# Altium footprint library ESP32_DEV_KIT.PcbLib: 10 footprints
Each footprint in its own frame and in the unit in brackets; x right, y up, seen from the top. Pads: shape width x height; smd on the part's side, far side on the other; paste and mask are expansions set on the pad; w line width, h text height; cw(c..) or ccw(c..) is an arc to the next point about the centre after c.
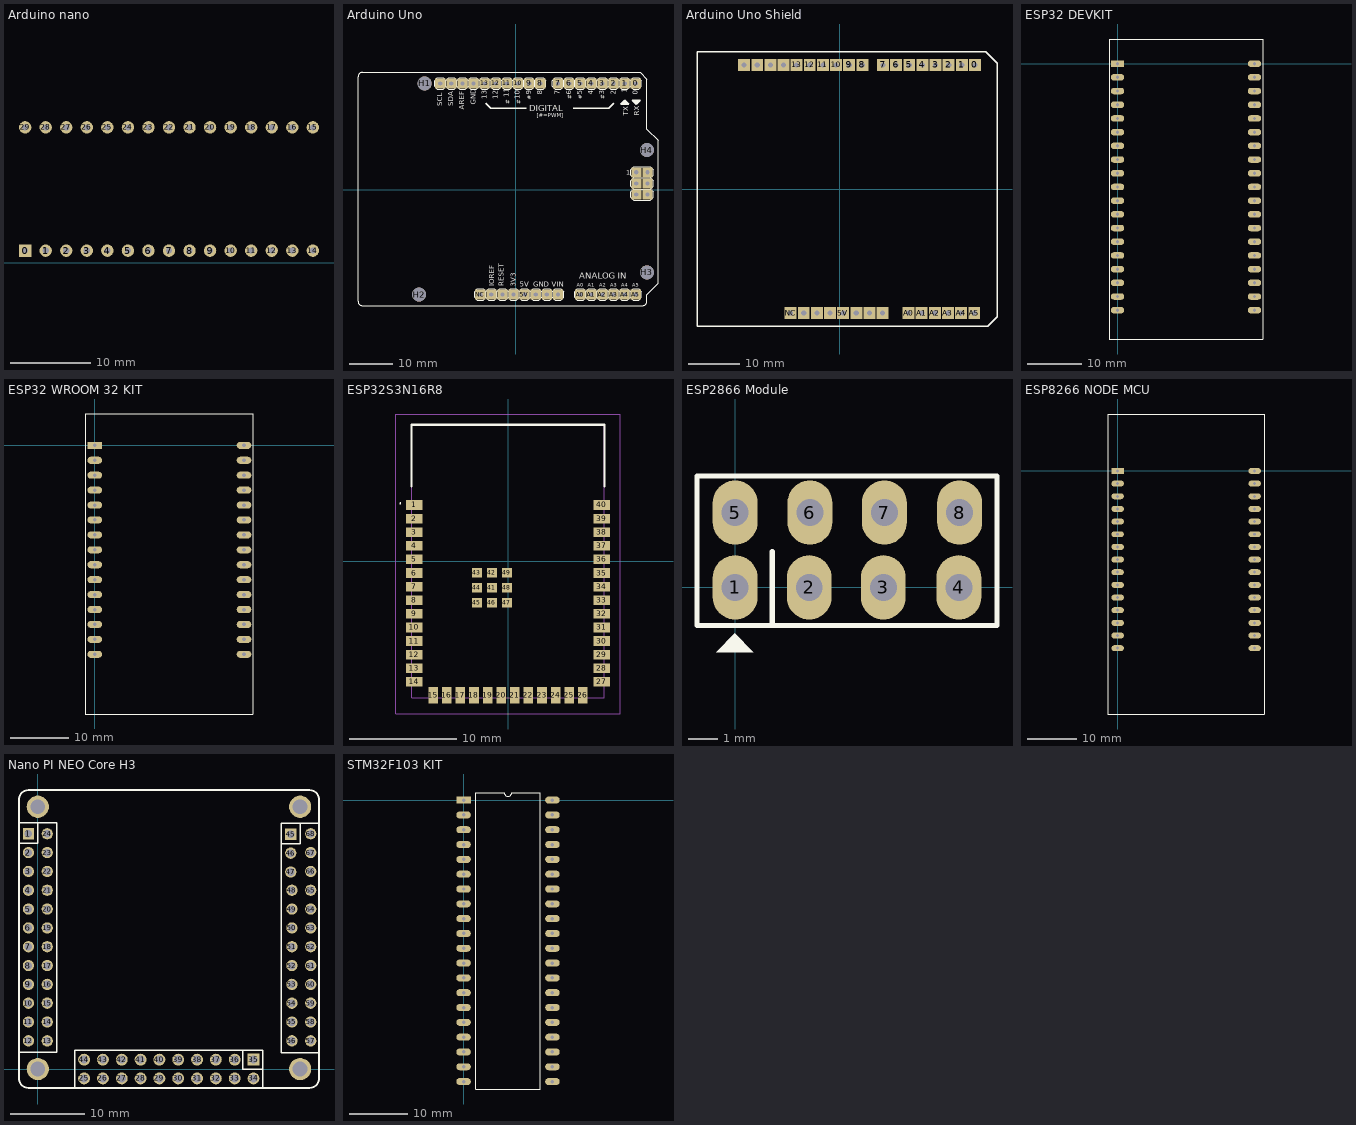
[diagram p0: the footprints below, top view; thin cyan lines are the x and y axes]

## Arduino nano [mil] "arduino nano"
height 1700
pads (30):
  rect 60x60 hole 30: 0(160,60)
  round 60 hole 30: 1(260,60) 2(360,60) 3(460,60) 4(560,60) 5(660,60) 6(760,60) 7(860,60) 8(960,60) 9(1060,60) 10(1160,60) 11(1260,60) 12(1360,60) 13(1460,60) 14(1560,60) 15(1560,660) 16(1460,660) 17(1360,660) 18(1260,660) 19(1160,660) 20(1060,660) 21(960,660) 22(860,660) 23(760,660) 24(660,660) 25(560,660) 26(460,660) 27(360,660) 28(260,660) 29(160,660)
3D body "Arduino_NANO_CH340.step": height 507.32, standoff -49.21, extent -25,10 1714.76,710

## Arduino Uno [mm]
pads (42):
  rect 2.3x2.3 hole 1: 0(27.44,24.26) 1(24.9,24.26) 2(22.36,24.26) 3(19.82,24.26) 3V3(-0.5,-24) 4(17.28,24.26) 5(14.74,24.26) 5V(2.04,-24) 6(12.2,24.26) 7(9.66,24.26) 8(5.596,24.26) 9(3.056,24.26) 10(0.516,24.26) 11(-2.024,24.26) 12(-4.564,24.26) 13(-7.104,24.26) A0(14.74,-24) A1(17.28,-24) A2(19.82,-24) A3(22.36,-24) A4(24.9,-24) A5(27.44,-24) AREF(-12.184,24.26) GND1(4.58,-24) GND2(7.12,-24) GND3(-9.644,24.26) ICSP1(27.567,3.94) ICSP2(30.107,3.94) ICSP3(27.567,1.4) ICSP4(30.107,1.4) ICSP5(27.567,-1.14) ICSP6(30.107,-1.14) IOREF(-5.58,-24) NC(-8.12,-24) RESET(-3.04,-24) SCL(-17.264,24.26) SDA(-14.724,24.26) Vin(9.66,-24)
  round 3.2 hole 3.2: H1(-20.82,24.26) H2(-22.09,-24) H3(29.98,-18.92) H4(29.98,9.02)
Bottom Layer:
  lines w0.305: -14.724,24.26 -14.47,24.26
Top Overlay:
  drawing of 281 lines, arcs and shapes, not listed
  text "SDA" at -14.271,19.087 h1.21
  text "SCL" at -16.8,19.1 h1.21
  text "#" at 3.6,20.5 h0.95
  text "#" at 12.8,20.6 h0.95
  text "#" at 20.3,20.6 h0.95
  text "#" at 15.2,20.6 h0.95
  text "#" at 1.1,19.5 h0.95
  text "#" at -1.4,19.5 h0.95
  text "[#=PWM]" at 4.834,16.513 h0.95
  text "0" at 27.887,21.676 h1.21
  text "1" at 25.347,22.079 h1.21
  text "2" at 22.807,21.676 h1.21
  text "3" at 20.267,21.676 h1.21
  text "4" at 17.727,21.676 h1.21
  text "5" at 15.187,21.676 h1.21
  text "6" at 12.647,21.676 h1.21
  text "7" at 10.107,21.676 h1.21
  text "8" at 6.043,21.676 h1.21
  text "9" at 3.503,21.676 h1.21
  text "10" at 0.963,20.669 h1.21
  text "11" at -1.577,21.072 h1.21
  text "12" at -4.117,20.669 h1.21
  text "13" at -6.657,20.669 h1.21
  text "RX" at 28.202,16.894 h1.21
  text "TX" at 25.662,16.919 h1.21
  text "DIGITAL" at 3.107,17.885 h1.42
  text "IOREF" at -4.945,-22.095 h1.21
  text "GND" at 3.97,-22.222 h1.21
  text "VIN" at 8.263,-22.222 h1.21
  text "A5" at 26.653,-22.197 h0.86
  text "A4" at 24.113,-22.197 h0.86
  text "A3" at 21.573,-22.197 h0.86
  text "A2" at 19.033,-22.197 h0.86
  text "A1" at 16.493,-22.197 h0.86
  text "3V3" at 0.008,-22.222 h1.21
  text "RESET" at -2.786,-22.095 h1.21
  text "GND" at -9.172,19.386 h1.21
  text "1" at 25.205,3.407 h1.08
  text "AREF" at -11.814,18.203 h1.21
  text "ANALOG IN" at 14.486,-20.444 h1.42
  text "A0" at 13.953,-22.197 h0.86
  text "5V" at 0.897,-22.222 h1.21

## Arduino Uno Shield [mm]
pads (32):
  rect 2.3x2.3 hole 1: 0(26.1,24) 1(23.56,24) 2(21.02,24) 3(18.48,24) 3V3(-1.92,-24) 4(15.94,24) 5(13.4,24) 5V(0.62,-24) 6(10.86,24) 7(8.32,24) 8(4.32,24) 9(1.78,24) 10(-0.76,24) 11(-3.3,24) 12(-5.84,24) 13(-8.38,24) A0(13.26,-24) A1(15.8,-24) A2(18.34,-24) A3(20.88,-24) A4(23.42,-24) A5(25.96,-24) AREF(-13.46,24) GND1(3.16,-24) GND2(5.7,-24) GND3(-10.92,24) IOREF(-7,-24) NC(-9.54,-24) RESET(-4.46,-24) SCL(-18.54,24) SDA(-16,24) Vin(8.24,-24)
Top Overlay:
  lines w0.254: -27.64,-26.5 -27.64,26.5 28.16,26.5 30.36,24.3 30.36,-6.9 30.36,-24.7 28.56,-26.5 -27.64,-26.5

## ESP32 DEVKIT [mm]
pads (38):
  rect 2.5x1.2 hole 0.6: 1(0,0)
  oval 2.5x1.2 hole 0.6: 2(0,-2.54) 3(0,-5.08) 4(0,-7.62) 5(0,-10.16) 6(0,-12.7) 7(0,-15.24) 8(0,-17.78) 9(0,-20.32) 10(0,-22.86) 11(0,-25.4) 12(0,-27.94) 13(0,-30.48) 14(0,-33.02) 15(0,-35.56) 16(0,-38.1) 17(0,-40.64) 18(0,-43.18) 19(0,-45.72) 20(25.4,-45.72) 21(25.4,-43.18) 22(25.4,-40.64) 23(25.4,-38.1) 24(25.4,-35.56) 25(25.4,-33.02) 26(25.4,-30.48) 27(25.4,-27.94) 28(25.4,-25.4) 29(25.4,-22.86) 30(25.4,-20.32) 31(25.4,-17.78) 32(25.4,-15.24) 33(25.4,-12.7) 34(25.4,-10.16) 35(25.4,-7.62) 36(25.4,-5.08) 37(25.4,-2.54) 38(25.4,0)
Top Overlay:
  lines w0.2: -1.524,-51.054 26.924,-51.054 26.924,4.572 13.335,4.572 -1.524,4.572 -1.524,-51.054
3D body "Goouuu-ESP32 Development Board.STEP": height 9.68, standoff -3.46, extent -1.27,-50.99 26.67,4.59

## ESP32 WROOM 32 KIT [mm]
pads (30):
  rect 2.5x1.2 hole 0.6: 1(0,0)
  oval 2.5x1.2 hole 0.6: 2(0,-2.54) 3(0,-5.08) 4(0,-7.62) 5(0,-10.16) 6(0,-12.7) 7(0,-15.24) 8(0,-17.78) 9(0,-20.32) 10(0,-22.86) 11(0,-25.4) 12(0,-27.94) 13(0,-30.48) 14(0,-33.02) 15(0,-35.56) 16(25.4,-35.56) 17(25.4,-33.02) 18(25.4,-30.48) 19(25.4,-27.94) 20(25.4,-25.4) 21(25.4,-22.86) 22(25.4,-20.32) 23(25.4,-17.78) 24(25.4,-15.24) 25(25.4,-12.7) 26(25.4,-10.16) 27(25.4,-7.62) 28(25.4,-5.08) 29(25.4,-2.54) 30(25.4,0)
Top Overlay:
  lines w0.2: -1.651,-45.72 26.924,-45.72 26.924,5.334 13.335,5.334 -1.651,5.334 -1.651,-45.72
3D body "ESP-WROOM32.STEP": height 10.49, standoff -1.91, extent -1.651,-45.596 26.849,5.334

## ESP32S3N16R8 [mm]
pads (49):
  rect 1.5x0.9 smd: 1(-8.75,5.26) 2(-8.75,3.99) 3(-8.75,2.72) 4(-8.75,1.45) 5(-8.75,0.18) 6(-8.75,-1.09) 7(-8.75,-2.36) 8(-8.75,-3.63) 9(-8.75,-4.9) 10(-8.75,-6.17) 11(-8.75,-7.44) 12(-8.75,-8.71) 13(-8.75,-9.98) 14(-8.75,-11.25) 27(8.75,-11.25) 28(8.75,-9.98) 29(8.75,-8.71) 30(8.75,-7.44) 31(8.75,-6.17) 32(8.75,-4.9) 33(8.75,-3.63) 34(8.75,-2.36) 35(8.75,-1.09) 36(8.75,0.18) 37(8.75,1.45) 38(8.75,2.72) 39(8.75,3.99) 40(8.75,5.26)
  rect 0.9x1.5 smd: 15(-6.985,-12.5) 16(-5.715,-12.5) 17(-4.445,-12.5) 18(-3.175,-12.5) 19(-1.905,-12.5) 20(-0.635,-12.5) 21(0.635,-12.5) 22(1.905,-12.5) 23(3.175,-12.5) 24(4.445,-12.5) 25(5.715,-12.5) 26(6.985,-12.5)
  rect 0.9x0.9 smd: 41(-1.5,-2.46) 42(-1.5,-1.06) 43(-2.9,-1.06) 44(-2.9,-2.46) 45(-2.9,-3.86) 46(-1.5,-3.86) 47(-0.1,-3.86) 48(-0.1,-2.46) 49(-0.1,-1.06)
Top Overlay:
  lines w0.1: -10.1,5.4 ccw(c-10.05,5.4) -10,5.4 ccw(c-10.05,5.4) -10.1,5.4
  lines w0.2: -9,7 -9,12.75 9,12.75 9,7
Mechanical 13:
  lines w0.1: -10.5,-14.25 -10.5,13.75 10.5,13.75 10.5,-14.25 -10.5,-14.25 ; -9,-12.75 -9,12.75 9,12.75 9,-12.75 -9,-12.75
3D body "step_temp.STEP": height 3.25, standoff 0, extent -9,-12.75 9,12.75

## ESP2866 Module [mil]
pads (8):
  oval 60x86 hole 36: 1(0,0) 2(99,0) 3(198,0) 4(299,0) 5(0,100) 6(100,100) 7(199.5,100) 8(300,100)
Top Overlay:
  region: -0.5,-61.5 -25.5,-86.5 24.5,-86.5
  lines w7: 49.5,-50.5 49.5,47.5 ; -51,-51 -51,49 -51,149 350,149 350,-51 -51,-51
3D body "User Library-Wi07C.STEP": height 381.4, standoff -78.35, extent -137.44,-817.38 433.43,159

## ESP8266 NODE MCU [mm]
pads (30):
  rect 2.5x1.2 hole 0.6: 1(0,0)
  oval 2.5x1.2 hole 0.6: 2(0,-2.54) 3(0,-5.08) 4(0,-7.62) 5(0,-10.16) 6(0,-12.7) 7(0,-15.24) 8(0,-17.78) 9(0,-20.32) 10(0,-22.86) 11(0,-25.4) 12(0,-27.94) 13(0,-30.48) 14(0,-33.02) 15(0,-35.56) 16(27.5,-35.56) 17(27.5,-33.02) 18(27.5,-30.48) 19(27.5,-27.94) 20(27.5,-25.4) 21(27.5,-22.86) 22(27.5,-20.32) 23(27.5,-17.78) 24(27.5,-15.24) 25(27.5,-12.7) 26(27.5,-10.16) 27(27.5,-7.62) 28(27.5,-5.08) 29(27.5,-2.54) 30(27.5,0)
Top Overlay:
  lines w0.2: -2.032,-48.768 29.464,-48.768 29.464,11.43 14.385,11.43 -2.032,11.43 -2.032,-48.768
3D body "ESP8266.STEP": height 9.03, standoff -1.11, extent -2.036,-48.677 29.464,11.303

## Nano PI NEO Core H3 [mm]
pads (72):
  rect 1.52x1.52 hole 1.02: 1(-1.27,31.75) 45(34.138,31.674)
  round 1.52 hole 1.02: 2(-1.27,29.21) 3(-1.27,26.67) 4(-1.27,24.13) 5(-1.27,21.59) 6(-1.27,19.05) 7(-1.27,16.51) 8(-1.27,13.97) 9(-1.27,11.43) 10(-1.27,8.89) 11(-1.27,6.35) 12(-1.27,3.81) 13(1.27,3.81) 14(1.27,6.35) 15(1.27,8.89) 16(1.27,11.43) 17(1.27,13.97) 18(1.27,16.51) 19(1.27,19.05) 20(1.27,21.59) 21(1.27,24.13) 22(1.27,26.67) 23(1.27,29.21) 24(1.27,31.75) 46(34.138,29.134) 47(34.138,26.594) 48(34.29,24.13) 49(34.29,21.59) 50(34.29,19.05) 51(34.29,16.51) 52(34.29,13.97) 53(34.29,11.43) 54(34.29,8.89) 55(34.29,6.35) 56(34.29,3.81) 57(36.83,3.81) 58(36.83,6.35) 59(36.83,8.89) 60(36.83,11.43) 61(36.83,13.97) 62(36.83,16.51) 63(36.83,19.05) 64(36.83,21.59) 65(36.83,24.13) 66(36.83,26.67) 67(36.83,29.21) 68(36.83,31.75)
  round 1.6 hole 1.1: 25(6.248,-1.27) 26(8.788,-1.27) 27(11.328,-1.27) 28(13.868,-1.27) 29(16.408,-1.27) 30(18.948,-1.27) 31(21.488,-1.27) 32(24.028,-1.27) 33(26.568,-1.27) 34(29.108,-1.27) 36(26.568,1.27) 37(24.028,1.27) 38(21.488,1.27) 39(18.948,1.27) 40(16.408,1.27) 41(13.868,1.27) 42(11.328,1.27) 43(8.788,1.27) 44(6.248,1.27)
  rect 1.6x1.6 hole 1.1: 35(29.108,1.27)
  round 3 hole 2: ""(0,0) ""(0,35.4) ""(35.4,0) ""(35.4,35.4)
Top Overlay:
  lines w0.2: -2.54,30.484 0,30.484 0,33.274 ; 27.686,2.54 27.686,0 30.226,0 ; 33.02,30.404 35.408,30.404 35.408,33.194 ; -2.54,2.294 -2.54,33.274 2.54,33.274 2.54,2.294 -2.54,2.294 ; 4.978,-2.54 4.978,2.54 30.378,2.54 30.378,-2.54 4.978,-2.54 ; 32.868,2.214 32.868,33.194 37.948,33.194 37.948,2.214 32.868,2.214
  lines w0.254: -2.54,-1.27 ccw(c-1.27,-1.27) -1.27,-2.54 36.678,-2.54 ccw(c36.678,-1.27) 37.948,-1.27 37.948,36.373 ccw(c36.678,36.373) 36.678,37.643 -1.27,37.643 ccw(c-1.27,36.373) -2.54,36.373 -2.54,2.294 -2.54,-1.27
3D body "61302421821.stp": height 8.51, standoff -3.09, extent 32.867,2.214 37.947,33.194
3D body "61302421821.stp": height 8.51, standoff -3.09, extent -2.54,2.294 2.54,33.274
3D body "61302021121.stp": height 8.55, standoff -2.99, extent 4.978,-2.54 30.378,2.54

## STM32F103 KIT [mm]
pads (40):
  rect 2.5x1.2 hole 0.6: 1(0,0)
  oval 2.5x1.2 hole 0.6: 2(0,-2.54) 3(0,-5.08) 4(0,-7.62) 5(0,-10.16) 6(0,-12.7) 7(0,-15.24) 8(0,-17.78) 9(0,-20.32) 10(0,-22.86) 11(0,-25.4) 12(0,-27.94) 13(0,-30.48) 14(0,-33.02) 15(0,-35.56) 16(0,-38.1) 17(0,-40.64) 18(0,-43.18) 19(0,-45.72) 20(0,-48.26) 21(15.24,-48.26) 22(15.24,-45.72) 23(15.24,-43.18) 24(15.24,-40.64) 25(15.24,-38.1) 26(15.24,-35.56) 27(15.24,-33.02) 28(15.24,-30.48) 29(15.24,-27.94) 30(15.24,-25.4) 31(15.24,-22.86) 32(15.24,-20.32) 33(15.24,-17.78) 34(15.24,-15.24) 35(15.24,-12.7) 36(15.24,-10.16) 37(15.24,-7.62) 38(15.24,-5.08) 39(15.24,-2.54) 40(15.24,0)
Top Overlay:
  lines w0.2: 2.085,-49.53 2.085,1.27 6.985,1.27 ccw(c7.62,1.27) 8.255,1.27 13.155,1.27 13.155,-49.53 2.085,-49.53
3D body "STM32F103C8T6_Blue_Pill v6.step": height 16.12, standoff -2.15, extent -3.81,-53.966 19.05,3.594